# Altium footprint library LUCID_LIGHT_Custom_Mosfet.PcbLib: 1 footprints
Each footprint in its own frame and in the unit in brackets; x right, y up, seen from the top. Pads: shape width x height; smd on the part's side, far side on the other; paste and mask are expansions set on the pad; w line width, h text height; cw(c..) or ccw(c..) is an arc to the next point about the centre after c.
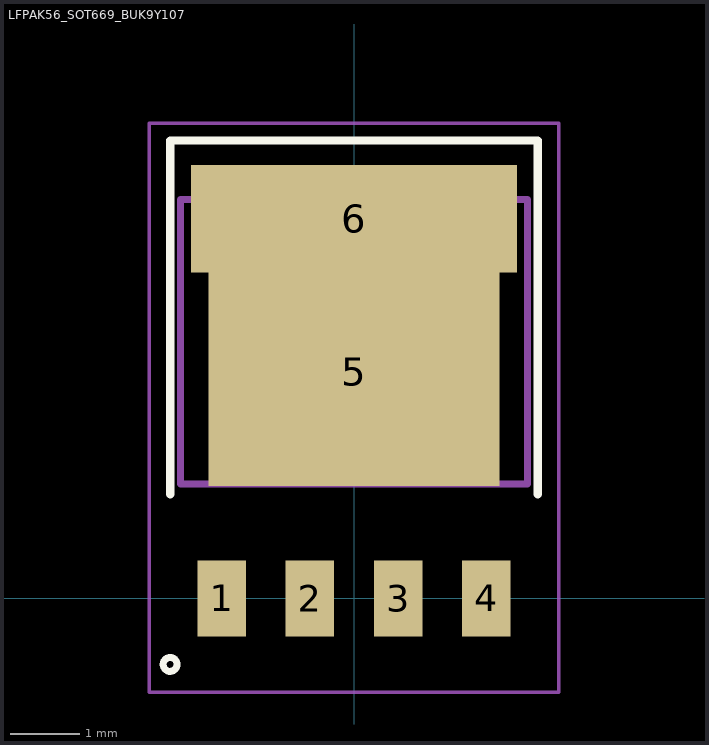
[diagram p0: the footprint, top view; thin cyan lines are the x and y axes]

## LFPAK56_SOT669_BUK9Y107 [mm]
pads (6):
  rect 0.7x1.1 smd paste-0.05 mask+0.075: 1(-1.905,0) 2(-0.635,0) 3(0.635,0) 4(1.905,0)
  rect 4.2x3.3 smd paste-2.2 mask+0.075: 5(0,3.27)
  rect 4.7x1.55 smd paste-2.2 mask+0.075: 6(0,5.47)
Top Overlay:
  circle w0.1: c-2.65,-0.95 r0.1
  lines w0.12: -2.65,1.5 -2.65,6.6 2.65,6.6 2.65,1.5
Top Paste:
  region: -1.6,1.9 -0.7,1.9 -0.7,2.5 -1.6,2.5
  region: -1.6,2.75 -0.7,2.75 -0.7,3.35 -1.6,3.35
  region: -0.45,1.9 0.45,1.9 0.45,2.5 -0.45,2.5
  region: -0.45,2.75 0.45,2.75 0.45,3.35 -0.45,3.35
  region: 0.7,1.9 1.6,1.9 1.6,2.5 0.7,2.5
  region: 0.7,2.75 1.6,2.75 1.6,3.35 0.7,3.35
  region: 0.7,3.6 1.6,3.6 1.6,4.2 0.7,4.2
  region: -0.45,3.6 0.45,3.6 0.45,4.2 -0.45,4.2
  region: -1.6,3.6 -0.7,3.6 -0.7,4.2 -1.6,4.2
  region: 1.58,5.27 2.18,5.27 2.18,6.17 1.58,6.17
  region: 0.3,5.27 0.9,5.27 0.9,6.17 0.3,6.17
  region: -0.9,5.27 -0.3,5.27 -0.3,6.17 -0.9,6.17
  region: -2.18,5.27 -1.58,5.27 -1.58,6.17 -2.18,6.17
Top Courtyard:
  lines w0.05: -2.95,-1.35 2.95,-1.35 2.95,6.85 -2.95,6.85 -2.95,-1.35
Top Assembly:
  lines w0.1: -2.5,1.65 -2.5,5.75 2.5,5.75 2.5,1.65 -2.5,1.65